# Altium schematic symbol library S2B-PH-SM4-TB.SchLib: 1 symbol
Pins are listed as number, name and electrical type; pins without a type are passive.

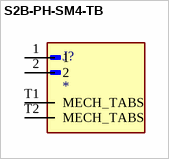
[diagram p0: symbol S2B-PH-SM4-TB]

## S2B-PH-SM4-TB
designator J?
MPN: S2B-PH-SM4-TB; MANUFACTURER: JST Sales; UNIT: MM; MAXIMUM_PACKAGE_HEIGHT: 5.5mm; STANDARD: Manufacturer Recommendations; Value: *
footprint JST_S2B-PH-SM4-TB
pins: 1, 2, T1 MECH_TABS, T2 MECH_TABS